# EAGLE library part OPA2227MOD (library OPA2227P)
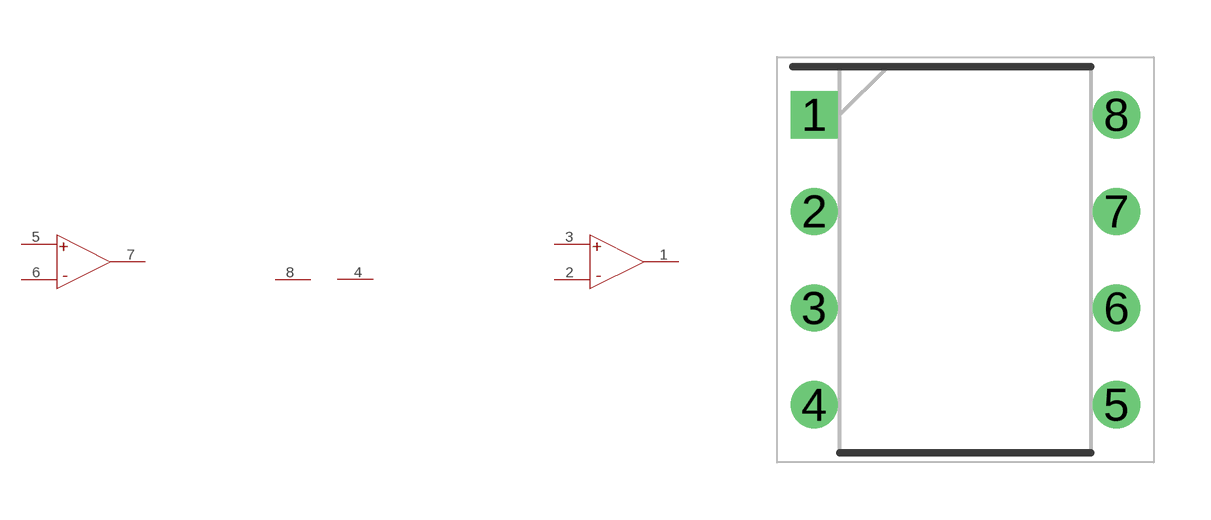
[diagram p1: symbol with the pads of DIP794W53P254L959H508Q8N; footprint DIP794W53P254L959H508Q8N]

Designator prefix -; gates G$1=PWR G$2=OPA2227MOD G$3=OPA2227MOD

## OPA2227MOD  [DIP794W53P254L959H508Q8N]
1  G$2:OUT
2  G$2:INVERT
3  G$2:NONINVERT
4  G$1:-V
5  G$3:NONINVERT
6  G$3:INVERT
7  G$3:OUT
8  G$1:+V

## Footprint DIP794W53P254L959H508Q8N (pad centres in mm)
p(r-pdip-t8)
drill 0.73 pad 1.13 square: 1 -3.97,3.81
drill 0.73 pad 1.13: 2 -3.97,1.27; 3 -3.97,-1.27; 4 -3.97,-3.81; 5 3.97,-3.81; 6 3.97,-1.27; 7 3.97,1.27; 8 3.97,3.81